# Altium schematic symbol library SC-32S_C97604.SchLib: 1 symbol
Pins are listed as number, name and electrical type; pins without a type are passive.

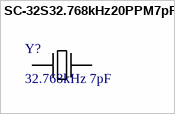
[diagram p0: symbol SC-32S32.768kHz20PPM7pF]

## SC-32S32.768kHz20PPM7pF
designator Y?, comment 32.768kHz 7pF
32.768 kHz 7 pF +/-20 ppm SMD3215-2P crystal resonator; Manufacturer: Seiko Instruments Inc.; Manufacturer Part Number: SC-32S32.768kHz20PPM7pF; ESR: 70kOhm max; Do Not Substitute: Yes; Component Type: Crystal Resonator; Frequency: 32.768kHz; Load Capacitance: 7pF; Frequency Tolerance: +/-20ppm; Operating Temperature: -40C to +85C; Package: SMD3215-2P; LCSC Part #: C97604; Supplier: LCSC; Supplier Part Number: C97604
footprint SC-32S_SMD3215_2P (Seiko SC-32S manufacturer recommended 3215 two-pad footprint)
pins: 1, 2